# Altium schematic symbol library C24452.SchLib: 1 symbol
Pins are listed as number, name and electrical type; pins without a type are passive.

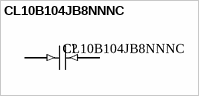
[diagram p0: symbol CL10B104JB8NNNC]

## CL10B104JB8NNNC
designator C?
100nF ±5% 50V Ceramic Capacitor X7R 0603; Name: C24452; Source: LCSC; Value: 100nF
footprint C0603 (100nF ±5% 50V Ceramic Capacitor X7R 0603)
pins: 1 (in), 2 (in)